# Altium footprint library Amin-Library.PcbLib: 601 footprints (part 28 of 38)
Each footprint in its own frame and in the unit in brackets; x right, y up, seen from the top. Pads: shape width x height; smd on the part's side, far side on the other; paste and mask are expansions set on the pad; w line width, h text height; cw(c..) or ccw(c..) is an arc to the next point about the centre after c.
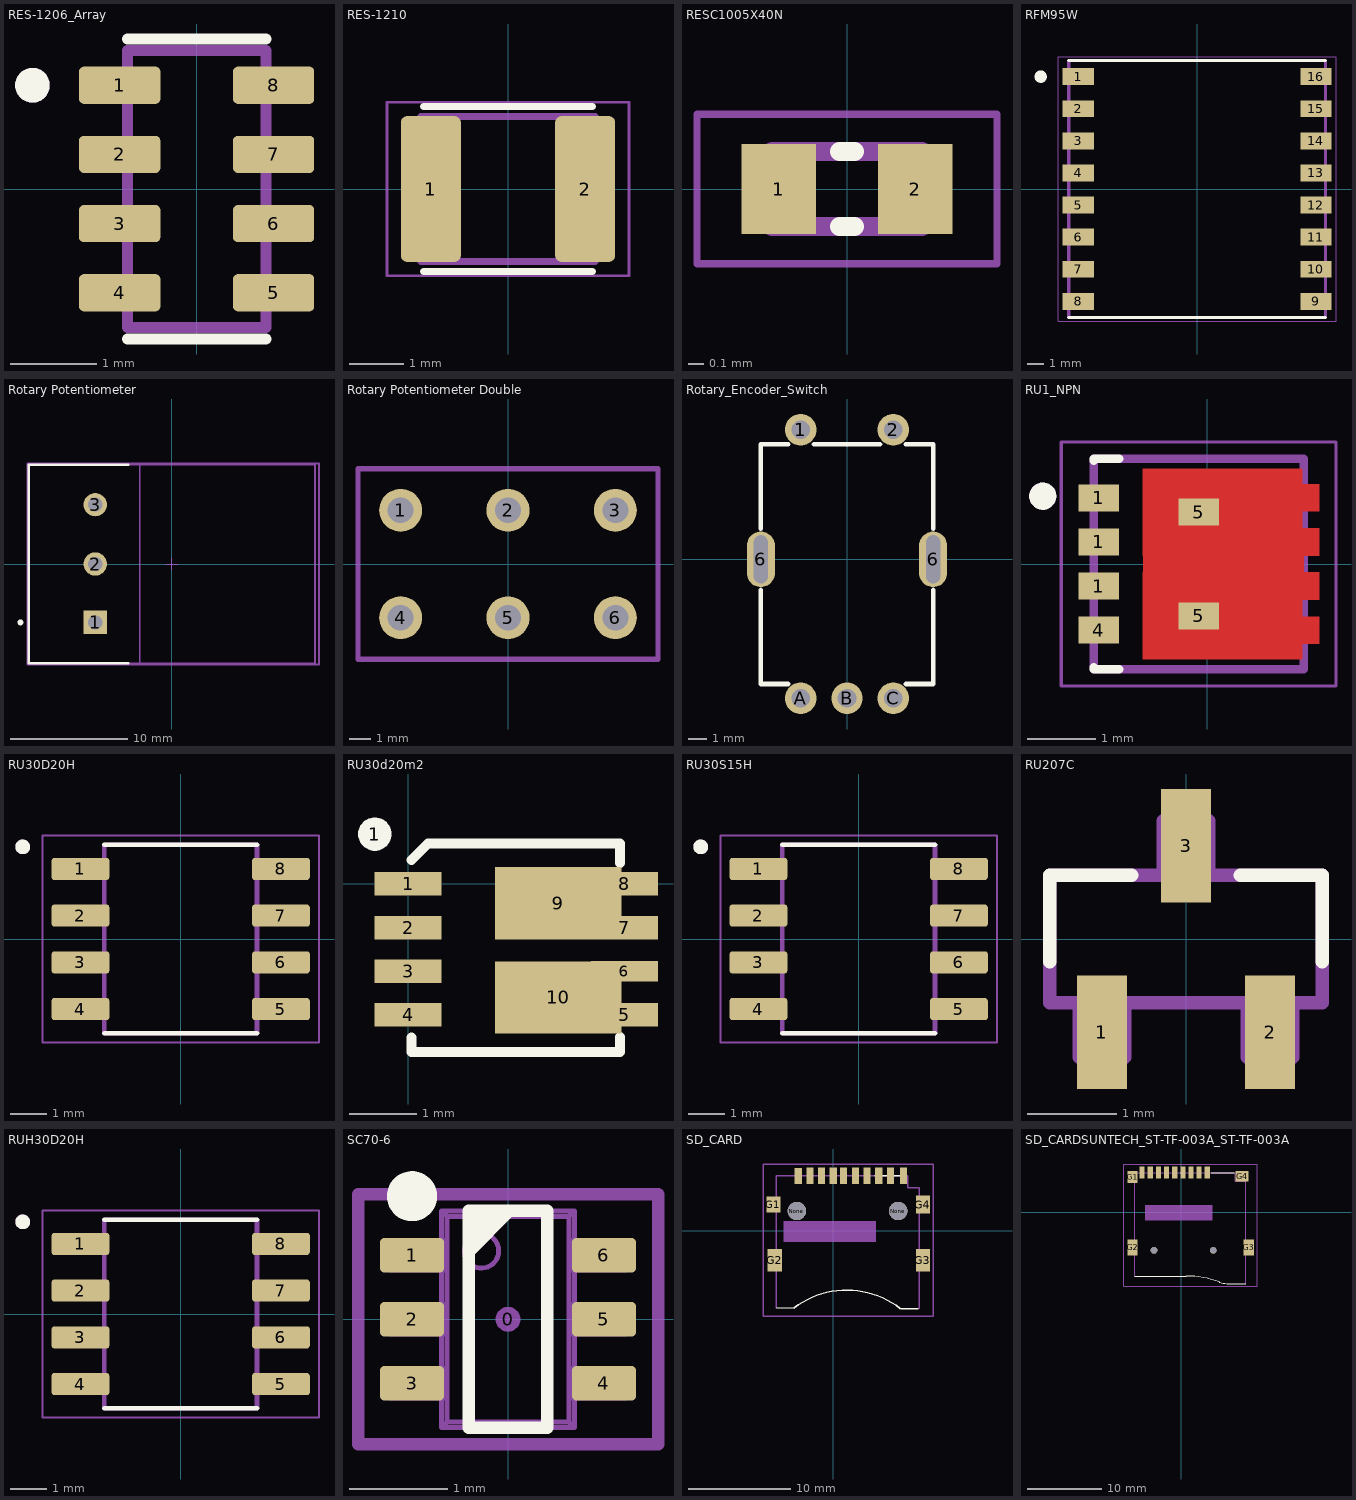
[diagram p27: the footprints below, top view; thin cyan lines are the x and y axes]

## RES-1206_Array [mm] "RES-1206_Array"
height 0.6
pads (8):
  rrect25% 0.94x0.43 smd: 1(-0.89,1.2) 2(-0.89,0.4) 3(-0.89,-0.4) 4(-0.89,-1.2) 5(0.89,-1.2) 6(0.89,-0.4) 7(0.89,0.4) 8(0.89,1.2)
Top Overlay:
  circle w0.2: c-1.9,1.2 r0.1
  lines w0.127: -0.8,-1.735 0.8,-1.735 ; -0.8,1.735 0.8,1.735
Mechanical 13:
  circle w0.2: c-1.9,1.2 r0.1
  lines w0.127: -0.8,-1.6 -0.8,1.6 0.8,1.6 0.8,-1.6 -0.8,-1.6
3D body "step_temp.STEP": height 0.6, standoff 0, extent -0.8,-1.6 0.8,1.6

## RES-1210 [mm]
pads (2):
  rrect20% 1.1x2.67 smd: 1(-1.415,0) 2(1.415,0)
Top Overlay:
  lines w0.127: -1.55,-1.515 1.55,-1.515 ; -1.55,1.515 1.55,1.515
Mechanical 13:
  lines w0.127: -1.6,-1.33 1.6,-1.33 1.6,1.33 -1.6,1.33 -1.6,-1.33
Mechanical 15:
  lines w0.05: -2.22,-1.59 2.22,-1.59 2.22,1.59 -2.22,1.59 -2.22,-1.59
3D body "2-1879463-5.stp": height 0.56, standoff 0.01, extent -1.6,-1.25 1.6,1.25

## RESC1005X40N [mm]
pads (2):
  rect 0.5x0.6 smd: 1(-0.455,0) 2(0.455,0)
Top Overlay:
  lines w0.127: -0.05,-0.25 0.05,-0.25 ; -0.05,0.25 0.05,0.25
Mechanical 4:
  region: -0.5,0.25 -0.3,0.25 -0.3,-0.25 -0.5,-0.25
  region: 0.3,0.25 0.5,0.25 0.5,-0.25 0.3,-0.25
  region: -0.5,0.25 -0.3,0.25 -0.3,-0.25 -0.5,-0.25
  region: 0.3,0.25 0.5,0.25 0.5,-0.25 0.3,-0.25
  lines w0.127: -0.5,-0.25 0.5,-0.25 ; -0.5,-0.25 -0.5,0.25 ; -0.5,-0.25 0.5,-0.25 ; -0.5,-0.25 -0.5,0.25 ; -0.5,0.25 0.5,0.25 ; -0.5,0.25 0.5,0.25 ; 0.5,-0.25 0.5,0.25 ; 0.5,-0.25 0.5,0.25
Mechanical 16:
  lines w0.05: -1,-0.5 1,-0.5 1,0.5 -1,0.5 -1,-0.5

## RFM95W [mm]
pads (16):
  rect 1.95x1.05 smd: 1(-7.4,7) 2(-7.4,5) 3(-7.4,3) 4(-7.4,1) 5(-7.4,-1) 6(-7.4,-3) 7(-7.4,-5) 8(-7.4,-7) 9(7.4,-7) 10(7.4,-5) 11(7.4,-3) 12(7.4,-1) 13(7.4,1) 14(7.4,3) 15(7.4,5) 16(7.4,7)
Top Overlay:
  circle w0.2: c-9.75,7 r0.292
  region: -10.011,7.2 -9.5,7.2 -9.5,6.808 -10.011,6.808
  lines w0.2: -8,-8 8,-8 ; -8,8 8,8
Mechanical 4:
  lines w0.2: -8,-8 -8,8 -8,-8 ; 8,-8 8,8 8,-8
Mechanical 16:
  lines w0.05: -8.65,-8.25 8.65,-8.25 8.65,8.25 -8.65,8.25 -8.65,-8.25
3D body "RFM95W-915S2--3DModel-STEP-56544.STEP": height 1.81, standoff 0.01, extent -8,-8 8,8

## Rotary Potentiometer [mm]
pads (3):
  rect 2x2 hole 1.2 paste-2539.97 mask+0: 1(-6.55,-5)
  round 2 hole 1.2 paste-2539.97 mask+0: 2(-6.55,0) 3(-6.55,5.08)
Top Overlay:
  circle w0.25: c-12.951,-5 r0.125
  lines w0.2: -3.7,-8.5 -12.25,-8.5 -12.25,8.5 -3.7,8.5
Bottom 3D Body:
  lines w0.2: -12.35,-8.6 -12.35,8.6 12.6,8.6 12.6,-8.6 -12.35,-8.6
  text ".Designator" at 0.125,0 h1
Dimensions:
  lines w0.15: -2.75,-8.6 -2.75,8.6 ; -12.25,-8.5 -12.25,8.5 12.25,8.5 12.25,-8.5 -12.25,-8.5
Mechanical 15:
  lines w0.1: -0.5,0 0.5,0 ; 0,-0.5 0,0.5
  lines w0.2: -12.35,-8.6 -12.35,8.6 12.6,8.6 12.6,-8.6 -12.35,-8.6
3D body "Rotary Potentiometer.STEP": height 21, standoff -3.75, extent -12.7,-8.05 15.3,8.05

## Rotary Potentiometer Double [mm]
pads (6):
  round 2 hole 1.2: 1(-5,2.5) 2(0,2.5) 3(5,2.5) 4(-5,-2.5) 5(0,-2.5) 6(5,-2.5)
Mechanical 1:
  lines w0.254: -6.985,-4.445 6.985,-4.445 6.985,4.445 -6.985,4.445 -6.985,-4.445

## Rotary_Encoder_Switch [mm]
pads (7):
  round 1.7 hole 1: 1(-2.5,7) 2(2.5,7) A(-2.5,-7.5) B(0,-7.5) C(2.5,-7.5)
  oval 1.524x3 hole 0.762 slot 2.6 at 90 deg: 6(-4.65,0) 6(4.65,0)
Top Overlay:
  lines w0.254: -4.65,-1.651 -4.65,-6.731 -3.175,-6.731 ; -4.65,1.651 -4.65,6.223 -3.175,6.223 ; -1.778,6.223 1.778,6.223 ; 3.175,-6.731 4.65,-6.731 4.65,-1.651 ; 3.175,6.223 4.65,6.223 4.65,1.651

## RU1_NPN [mm] "DFN_3*3"
pads (6):
  rect 0.6x0.4 smd: 1(-1.602,-0.325) 1(-1.602,0.325) 1(-1.602,0.975) 4(-1.602,-0.975)
  rect 0.6x0.4 smd paste-1 mask+0: 5(-0.127,-0.765) 5(-0.127,0.765)
Top Layer:
  rectangle: -0.952,-0.42 1.423,0.42
  region: 1.398,1.175 1.648,1.175 1.648,0.775 1.398,0.775 1.398,0.525 1.648,0.525 1.648,0.125 -0.952,0.125 -0.952,1.405 1.398,1.405
  region: 1.648,-0.525 1.398,-0.525 1.398,-0.775 1.648,-0.775 1.648,-1.175 1.398,-1.175 1.398,-1.405 -0.952,-1.405 -0.952,-0.125 1.648,-0.125
Top Overlay:
  circle w0.2: c-2.427,1 r0.1
  lines w0.127: -1.677,-1.525 -1.677,-1.55 -1.302,-1.55 ; -1.677,1.525 -1.677,1.55 -1.302,1.55
Top Paste:
  region: 0.123,0.42 -0.757,0.42 -0.757,1.11 0.123,1.11
  region: 1.203,0.42 0.323,0.42 0.323,1.11 1.203,1.11
  region: 0.123,-1.11 -0.757,-1.11 -0.757,-0.42 0.123,-0.42
  region: 1.203,-1.11 0.323,-1.11 0.323,-0.42 1.203,-0.42
  region: 1.648,0.775 1.403,0.775 1.403,1.175 1.648,1.175
  region: 1.648,0.125 1.403,0.125 1.403,0.525 1.648,0.525
  region: 1.648,-0.525 1.403,-0.525 1.403,-0.125 1.648,-0.125
  region: 1.648,-1.175 1.403,-1.175 1.403,-0.775 1.648,-0.775
Top Solder:
  region: 1.498,1.275 1.748,1.275 1.748,0.675 1.498,0.675 1.498,0.625 1.748,0.625 1.748,0.025 -1.052,0.025 -1.052,1.505 1.498,1.505
  region: 1.748,-0.625 1.498,-0.625 1.498,-0.675 1.748,-0.675 1.748,-1.275 1.498,-1.275 1.498,-1.505 -1.052,-1.505 -1.052,0.42 1.748,0.42
Mechanical 13:
  circle w0.2: c-2.427,1 r0.1
  lines w0.127: -1.677,-1.55 -1.677,1.55 1.423,1.55 1.423,-1.55 -1.677,-1.55
Mechanical 15:
  lines w0.05: -2.152,-1.8 -2.152,1.8 1.898,1.8 1.898,-1.8 -2.152,-1.8
3D body "step_temp.STEP": height 0.8, standoff 0, extent -1.802,-1.6 1.548,1.6

## RU30D20H [mm] "Dual N Mosfet SOP-8"
pads (8):
  rrect25% 1.57x0.6 smd: 1(-2.725,1.905) 2(-2.725,0.635) 3(-2.725,-0.635) 4(-2.725,-1.905) 5(2.725,-1.905) 6(2.725,-0.635) 7(2.725,0.635) 8(2.725,1.905)
Top Overlay:
  circle w0.2: c-4.295,2.505 r0.1
  lines w0.127: -2.075,-2.565 2.075,-2.565 ; -2.075,2.565 2.075,2.565
Mechanical 13:
  circle w0.2: c-4.295,2.505 r0.1
  lines w0.127: -2.075,-2.565 -2.075,2.565 2.075,2.565 2.075,-2.565 -2.075,-2.565
Mechanical 15:
  lines w0.05: -3.76,-2.815 -3.76,2.815 3.76,2.815 3.76,-2.815 -3.76,-2.815
3D body "step_temp.STEP": height 1.79, standoff -0.01, extent -3,-2.46 3,2.46

## RU30d20m2 [mm] "PDFN3333"
height 2.65
pads (11):
  round 0.5 on Top Overlay: 1(-0.495,0.74)
  rect 1x0.35 smd: 1(0,0) 2(0,-0.65) 3(0,-1.3) 4(0,-1.95) 5(3.216,-1.95) 7(3.216,-0.65) 8(3.216,0)
  rect 1x0.3 smd: 6(3.216,-1.3)
  rect 1.88x1.075 smd: 9(2.232,-0.29) 10(2.232,-1.69)
Top Overlay:
  lines w0.15: 0.052,-2.5 3.152,-2.5 ; 0.052,0.355 0.297,0.6 3.152,0.6 3.152,0.31
  lines w0.152: 0.052,-2.5 0.052,-2.29 ; 3.152,-2.5 3.152,-2.28
3D body "step_temp.STEP": height 0.8, standoff 0, extent -0.024,-2.55 3.326,0.65

## RU30S15H [mm] "DUAL P Mosfet SOP-8"
pads (8):
  rrect25% 1.57x0.6 smd: 1(-2.725,1.905) 2(-2.725,0.635) 3(-2.725,-0.635) 4(-2.725,-1.905) 5(2.725,-1.905) 6(2.725,-0.635) 7(2.725,0.635) 8(2.725,1.905)
Top Overlay:
  circle w0.2: c-4.295,2.505 r0.1
  lines w0.127: -2.075,-2.565 2.075,-2.565 ; -2.075,2.565 2.075,2.565
Mechanical 13:
  circle w0.2: c-4.295,2.505 r0.1
  lines w0.127: -2.075,-2.565 2.075,-2.565 2.075,2.565 -2.075,2.565 -2.075,-2.565
Mechanical 15:
  lines w0.05: -3.76,-2.815 3.76,-2.815 3.76,2.815 -3.76,2.815 -3.76,-2.815
3D body "step_temp.STEP": height 1.79, standoff -0.01, extent -3,-2.46 3,2.46

## RU207C [mil] "N-Channel Advanced Power MOSFET  SOT23-3"
pads (3):
  rect 22x50 smd: 1(-37,-41) 2(37,-41) 3(0,41)
Top Overlay:
  lines w6: -60,-10 -60,28 -24,28 ; 24,28 60,28 60,-10
Mechanical 4:
  lines w6: -60,-28 -60,28 ; -60,-28 60,-28 ; -60,-28 -60,28 ; -60,-28 60,-28 ; -60,28 60,28 ; -60,28 60,28 ; -47,-52 -27,-52 ; -47,-52 -47,-28 ; -47,-52 -27,-52 ; -47,-52 -47,-28 ; -47,-28 -27,-28 ; -47,-28 -27,-28 ; -27,-52 -27,-28 ; -27,-52 -27,-28 ; -10,28 -10,52 ; -10,28 10,28 ; -10,28 -10,52 ; -10,28 10,28 ; -10,52 10,52 ; -10,52 10,52 ; 10,28 10,52 ; 10,28 10,52 ; 27,-52 47,-52 ; 27,-52 27,-28 ; 27,-52 47,-52 ; 27,-52 27,-28 ; 27,-28 47,-28 ; 27,-28 47,-28 ; 47,-52 47,-28 ; 47,-52 47,-28 ; 60,-28 60,28 ; 60,-28 60,28
3D body "CircuitWorks-SOT-23.step": height 43.81, standoff 0.5, extent -59.06,-54.21 59.05,44.21

## RUH30D20H [mm] "DUAL P Mosfet SOP-8"
pads (8):
  rrect25% 1.57x0.6 smd: 1(-2.725,1.905) 2(-2.725,0.635) 3(-2.725,-0.635) 4(-2.725,-1.905) 5(2.725,-1.905) 6(2.725,-0.635) 7(2.725,0.635) 8(2.725,1.905)
Top Overlay:
  circle w0.2: c-4.295,2.505 r0.1
  lines w0.127: -2.075,-2.565 2.075,-2.565 ; -2.075,2.565 2.075,2.565
Mechanical 13:
  circle w0.2: c-4.295,2.505 r0.1
  lines w0.127: -2.075,-2.565 2.075,-2.565 2.075,2.565 -2.075,2.565 -2.075,-2.565
Mechanical 15:
  lines w0.05: -3.76,-2.815 3.76,-2.815 3.76,2.815 -3.76,2.815 -3.76,-2.815
3D body "step_temp.STEP": height 1.79, standoff -0.01, extent -3,-2.46 3,2.46

## SC70-6 [mm] "SC70-6; SOT-363"
height 1.6
pads (7):
  round 0.254 on Mech15: 0(0,0)
  rrect25% 0.65x0.35 smd: 1(-0.975,0.65) 2(-0.975,0) 3(-0.975,-0.65) 4(0.975,-0.65) 5(0.975,0) 6(0.975,0.65)
Top Overlay:
  circle w0.254: c-0.975,1.25 r0.127
  region: 0.1,1.1 -0.4,0.6 -0.4,1.1
  lines w0.127: -0.4,-1.1 0.4,-1.1 0.4,1.1 -0.4,1.1 -0.4,-1.1
Mechanical 13:
  circle w0.05: c-0.27,0.695 r0.175
  lines w0.05: -1.028,-0.8 -1.028,-0.5 ; -1.028,-0.15 -1.028,0.15 ; -1.028,0.5 -1.028,0.8 ; -0.937,-0.8 -0.937,-0.5 ; -0.937,-0.15 -0.937,0.15 ; -0.937,0.5 -0.937,0.8 ; -0.925,-0.8 -0.925,-0.5 ; -0.925,-0.15 -0.925,0.15 ; -0.925,0.5 -0.925,0.8 ; 0.925,-0.8 0.925,-0.5 ; 0.925,-0.15 0.925,0.15 ; 0.925,0.5 0.925,0.8 ; 0.937,-0.8 0.937,-0.5 ; 0.937,-0.15 0.937,0.15 ; 0.937,0.5 0.937,0.8 ; 1.028,-0.8 1.028,-0.5 ; 1.028,-0.15 1.028,0.15 ; 1.028,0.5 1.028,0.8 ; -0.675,-1.1 -0.619,-1.044 ; -0.675,-1.1 -0.675,1.1 ; -0.675,-1.1 0.675,-1.1 ; -0.675,1.1 -0.619,1.044 ; -0.675,1.1 0.675,1.1 ; -0.619,-1.044 -0.619,1.044 ; -0.619,-1.044 0.619,-1.044 ; -0.619,1.044 0.619,1.044 ; 0.619,-1.044 0.619,1.044 ; 0.619,-1.044 0.675,-1.1 ; 0.619,1.044 0.675,1.1 ; 0.675,-1.1 0.675,1.1 ; -1.2,-0.8 -0.654,-0.8 -0.654,-0.5 -1.2,-0.5 -1.2,-0.8 ; -1.2,-0.15 -0.654,-0.15 -0.654,0.15 -1.2,0.15 -1.2,-0.15 ; -1.2,0.5 -0.654,0.5 -0.654,0.8 -1.2,0.8 -1.2,0.5 ; 0.654,-0.8 0.654,-0.5 1.2,-0.5 1.2,-0.8 0.654,-0.8 ; 0.654,-0.15 0.654,0.15 1.2,0.15 1.2,-0.15 0.654,-0.15 ; 0.654,0.5 0.654,0.8 1.2,0.8 1.2,0.5 0.654,0.5
Mechanical 15:
  lines w0.127: -1.524,-1.27 1.524,-1.27 1.524,1.27 -1.524,1.27 -1.524,-1.27
3D body "SOT363.STEP": height 1.1, standoff 0, extent -1.2,-1.1 1.2,1.1

## SD_CARD [mm]
pads (16):
  rect 0.7x1.6 smd: 1(4.445,5.334) 2(3.302,5.334) 3(2.159,5.334) 4(1.016,5.334) 5(0,5.334) 6(-1.143,5.334) 7(-2.286,5.334) 8(-3.429,5.33) CD1(6.858,5.334) CD2(5.588,5.334)
  rect 1.4x1.6 smd: G1(-5.842,2.54)
  rect 1.4x2.2 smd: G2(-5.715,-2.921) G3(8.763,-2.921)
  rect 1.4x1.8 smd: G4(8.763,2.54)
  round 1.8 hole 1.8 unplated: None(-3.556,1.905) None(6.35,1.905)
Top Overlay:
  lines w0.127: -5.535,-7.536 -3.825,-7.575 ; -3.824,-7.556 cw(c1.321,-14.322) 6.554,-7.624 ; 4.07,5.33 7.17,5.33 ; 6.604,-7.624 8.318,-7.624
Mechanical 1:
  region: 4.173,0.927 4.173,-1.076 -4.836,-1.076 -4.836,0.927
  lines w0.127: -5.588,-7.575 -5.588,5.33 7.302,5.33 7.302,4.187 8.382,4.187 8.382,-7.624 ; -6.858,-8.382 9.779,-8.382 9.779,6.5 -6.858,6.5 -6.858,-8.382
3D body "User Library-Socket-MicroSD-Type1.step": height 1.71, standoff -0.54, extent -5.653,-7.574 8.447,6.026

## SD_CARDSUNTECH_ST-TF-003A_ST-TF-003A [mm]
pads (15):
  rect 0.7x1.6 smd: 1(3.52,5.33) 2(2.42,5.33) 3(1.32,5.33) 4(0.22,5.33) 5(-0.88,5.33) 6(-1.98,5.33) 7(-3.08,5.33) 8(-4.18,5.33) 9(-5.28,5.33)
  rect 1.4x1.6 smd: G1(-6.58,4.73)
  rect 1.4x2.2 smd: G2(-6.58,-4.77) G3(9.12,-4.77)
  rect 1.8x1.4 smd: G4(8.22,4.83)
  round 0.9 hole 0.9 unplated: None(-3.68,-5.17) None(4.32,-5.17)
Top Overlay:
  lines w0.127: -6.287,-8.64 0.647,-8.64 cw(c0.647,-21.34) 5.198,-9.484 ; 4.07,5.33 7.17,5.33 ; 5.161,-9.469 ccw(c6.168,-6.847) 6.168,-9.656 8.699,-9.656
Mechanical 1:
  region: 4.173,0.927 4.173,-1.076 -4.836,-1.076 -4.836,0.927
  lines w0.127: -6.287,-8.64 -6.287,5.33 7.302,5.33 7.302,4.187 8.699,4.187 8.699,-9.656 ; -7.75,-10 -7.75,6.5 10.25,6.5 10.25,-10 -7.75,-10
3D body "User Library-XKXFS-N02-XXT.STEP": height 1.78, standoff -0.62, extent -6.93,-9.412 9.47,5.588
3D body "User Library-Micro_SD.step": height 1.46, standoff 0.48, extent -4.712,-11.107 6.288,3.893